# Altium footprint library Footprint-Lib-PhilsLab.PcbLib: 352 footprints (part 3 of 22)
Each footprint in its own frame and in the unit in brackets; x right, y up, seen from the top. Pads: shape width x height; smd on the part's side, far side on the other; paste and mask are expansions set on the pad; w line width, h text height; cw(c..) or ccw(c..) is an arc to the next point about the centre after c.
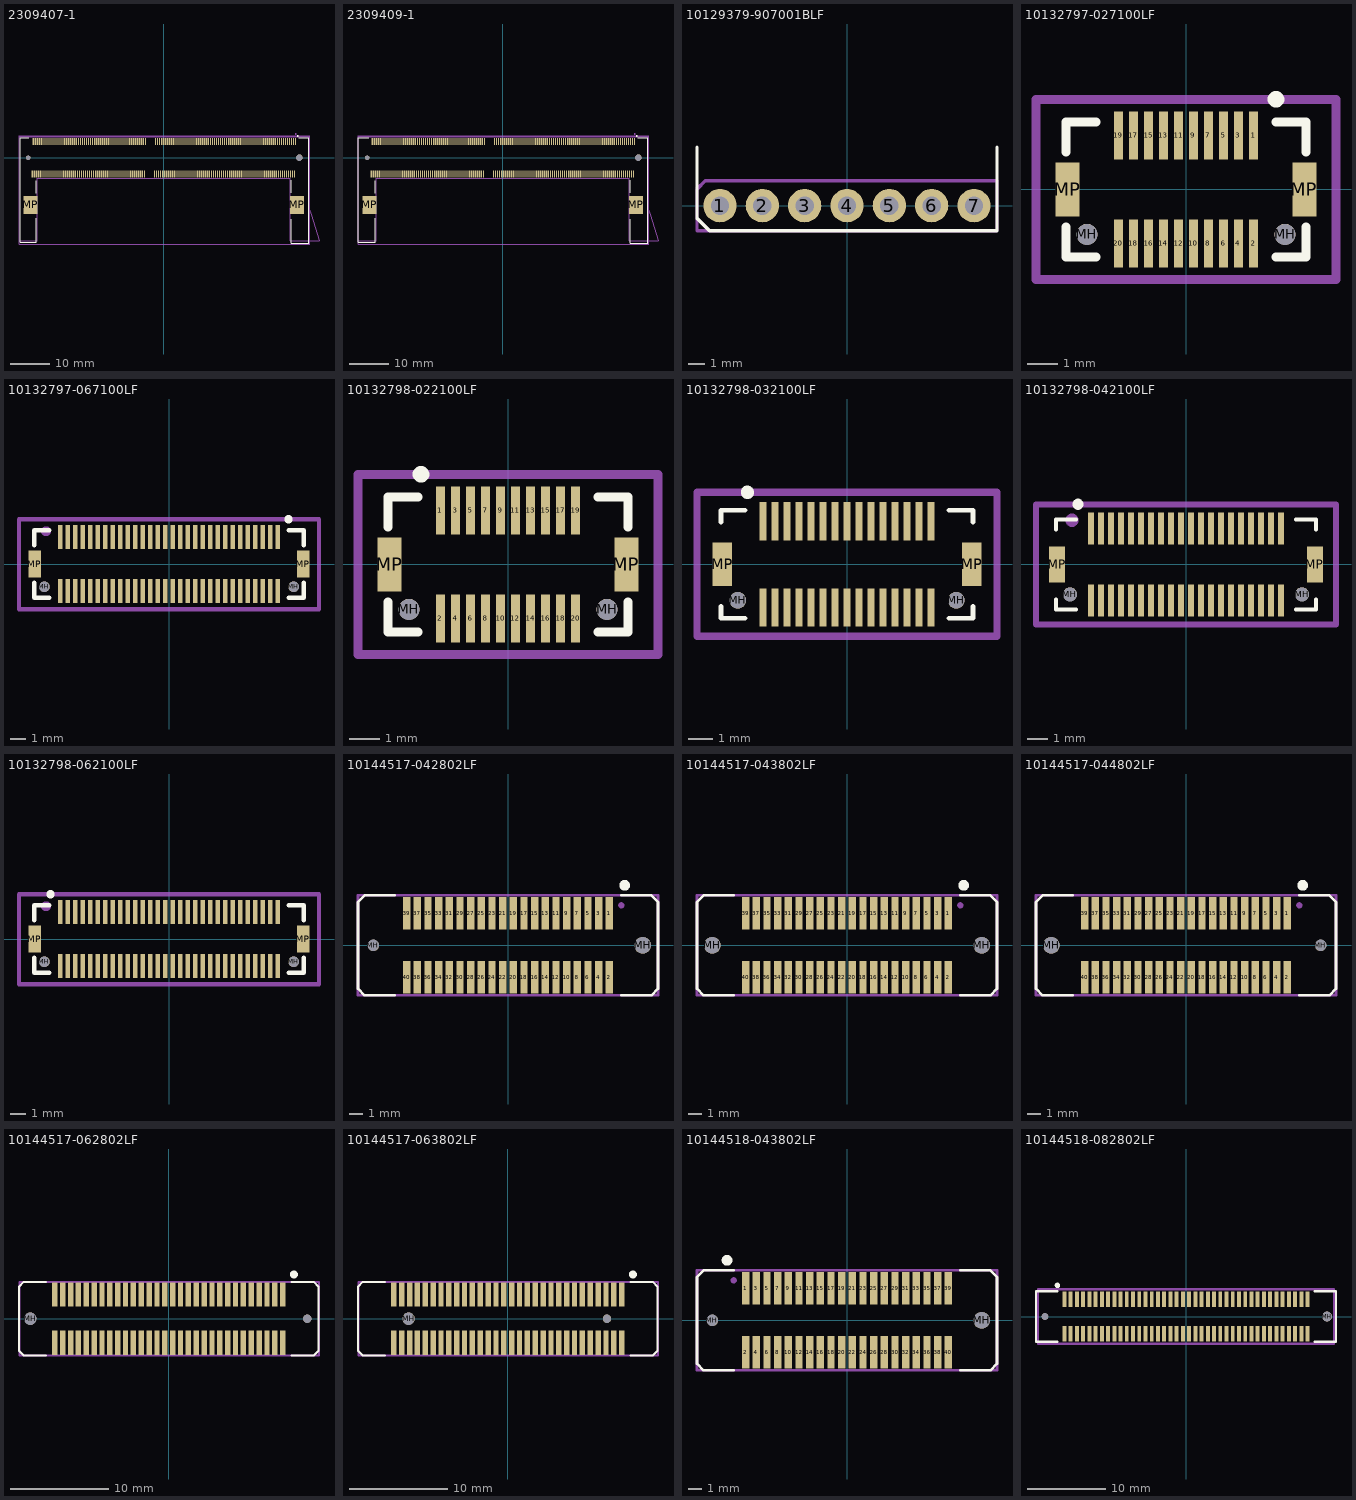
[diagram p2: the footprints below, top view; thin cyan lines are the x and y axes]

## 2309407-1 [mm]
pads (264):
  rect 0.3x1.75 smd mask+0.15: 1(33.375,4.1) 2(33.125,-4.1) 3(32.875,4.1) 4(32.625,-4.1) 5(32.375,4.1) 6(32.125,-4.1) 7(31.875,4.1) 8(31.625,-4.1) 9(31.375,4.1) 10(31.125,-4.1) 11(30.875,4.1) 12(30.625,-4.1) 13(30.375,4.1) 14(30.125,-4.1) 15(29.875,4.1) 16(29.625,-4.1) 17(29.375,4.1) 18(29.125,-4.1) 19(28.875,4.1) 20(28.625,-4.1) 21(28.375,4.1) 22(28.125,-4.1) 23(27.875,4.1) 24(27.625,-4.1) 25(27.375,4.1) 26(27.125,-4.1) 27(26.875,4.1) 28(26.625,-4.1) 29(26.375,4.1) 30(26.125,-4.1) 31(25.875,4.1) 32(25.625,-4.1) 33(25.375,4.1) 34(25.125,-4.1) 35(24.875,4.1) 36(24.625,-4.1) 37(24.375,4.1) 38(24.125,-4.1) 39(23.875,4.1) 40(23.625,-4.1) 41(23.375,4.1) 42(23.125,-4.1) 43(22.875,4.1) 44(22.625,-4.1) 45(22.375,4.1) 46(22.125,-4.1) 47(21.875,4.1) 48(21.625,-4.1) 49(21.375,4.1) 50(21.125,-4.1) 51(20.875,4.1) 52(20.625,-4.1) 53(20.375,4.1) 54(20.125,-4.1) 55(19.875,4.1) 56(19.625,-4.1) 57(19.375,4.1) 58(19.125,-4.1) 59(18.875,4.1) 60(18.625,-4.1) 61(18.375,4.1) 62(18.125,-4.1) 63(17.875,4.1) 64(17.625,-4.1) 65(17.375,4.1) 66(17.125,-4.1) 67(16.875,4.1) 68(16.625,-4.1) 69(16.375,4.1) 70(16.125,-4.1) 71(15.875,4.1) 72(15.625,-4.1) 73(15.375,4.1) 74(15.125,-4.1) 75(14.875,4.1) 76(14.625,-4.1) 77(14.375,4.1) 78(14.125,-4.1) 79(13.875,4.1) 80(13.625,-4.1) 81(13.375,4.1) 82(13.125,-4.1) 83(12.875,4.1) 84(12.625,-4.1) 85(12.375,4.1) 86(12.125,-4.1) 87(11.875,4.1) 88(11.625,-4.1) 89(11.375,4.1) 90(11.125,-4.1) 91(10.875,4.1) 92(10.625,-4.1) 93(10.375,4.1) 94(10.125,-4.1) 95(9.875,4.1) 96(9.625,-4.1) 97(9.375,4.1) 98(9.125,-4.1) 99(8.875,4.1) 100(8.625,-4.1) 101(8.375,4.1) 102(8.125,-4.1) 103(7.875,4.1) 104(7.625,-4.1) 105(7.375,4.1) 106(7.125,-4.1) 107(6.875,4.1) 108(6.625,-4.1) 109(6.375,4.1) 110(6.125,-4.1) 111(5.875,4.1) 112(5.625,-4.1) 113(5.375,4.1) 114(5.125,-4.1) 115(4.875,4.1) 116(4.625,-4.1) 117(4.375,4.1) 118(4.125,-4.1) 119(3.875,4.1) 120(3.625,-4.1) 121(3.375,4.1) 122(3.125,-4.1) 123(2.875,4.1) 124(2.625,-4.1) 125(2.375,4.1) 126(2.125,-4.1) 127(1.875,4.1) 128(1.625,-4.1) 129(1.375,4.1) 130(1.125,-4.1) 131(0.875,4.1) 132(0.625,-4.1) 133(0.375,4.1) 134(0.125,-4.1) 135(-0.125,4.1) 136(-0.375,-4.1) 137(-0.625,4.1) 138(-0.875,-4.1) 139(-1.125,4.1) 140(-1.375,-4.1) 141(-1.625,4.1) 142(-1.875,-4.1) 143(-2.125,4.1) 144(-2.375,-4.1) 145(-4.625,4.1) 146(-4.875,-4.1) 147(-5.125,4.1) 148(-5.375,-4.1) 149(-5.625,4.1) 150(-5.875,-4.1) 151(-6.125,4.1) 152(-6.375,-4.1) 153(-6.625,4.1) 154(-6.875,-4.1) 155(-7.125,4.1) 156(-7.375,-4.1) 157(-7.625,4.1) 158(-7.875,-4.1) 159(-8.125,4.1) 160(-8.375,-4.1) 161(-8.625,4.1) 162(-8.875,-4.1) 163(-9.125,4.1) 164(-9.375,-4.1) 165(-9.625,4.1) 166(-9.875,-4.1) 167(-10.125,4.1) 168(-10.375,-4.1) 169(-10.625,4.1) 170(-10.875,-4.1) 171(-11.125,4.1) 172(-11.375,-4.1) 173(-11.625,4.1) 174(-11.875,-4.1) 175(-12.125,4.1) 176(-12.375,-4.1) 177(-12.625,4.1) 178(-12.875,-4.1) 179(-13.125,4.1) 180(-13.375,-4.1) 181(-13.625,4.1) 182(-13.875,-4.1) 183(-14.125,4.1) 184(-14.375,-4.1) 185(-14.625,4.1) 186(-14.875,-4.1) 187(-15.125,4.1) 188(-15.375,-4.1) 189(-15.625,4.1) 190(-15.875,-4.1) 191(-16.125,4.1) 192(-16.375,-4.1) 193(-16.625,4.1) 194(-16.875,-4.1) 195(-17.125,4.1) 196(-17.375,-4.1) 197(-17.625,4.1) 198(-17.875,-4.1) 199(-18.125,4.1) 200(-18.375,-4.1) 201(-18.625,4.1) 202(-18.875,-4.1) 203(-19.125,4.1) 204(-19.375,-4.1) 205(-19.625,4.1) 206(-19.875,-4.1) 207(-20.125,4.1) 208(-20.375,-4.1) 209(-20.625,4.1) 210(-20.875,-4.1) 211(-21.125,4.1) 212(-21.375,-4.1) 213(-21.625,4.1) 214(-21.875,-4.1) 215(-22.125,4.1) 216(-22.375,-4.1) 217(-22.625,4.1) 218(-22.875,-4.1) 219(-23.125,4.1) 220(-23.375,-4.1) 221(-23.625,4.1) 222(-23.875,-4.1) 223(-24.125,4.1) 224(-24.375,-4.1) 225(-24.625,4.1) 226(-24.875,-4.1) 227(-25.125,4.1) 228(-25.375,-4.1) 229(-25.625,4.1) 230(-25.875,-4.1) 231(-26.125,4.1) 232(-26.375,-4.1) 233(-26.625,4.1) 234(-26.875,-4.1) 235(-27.125,4.1) 236(-27.375,-4.1) 237(-27.625,4.1) 238(-27.875,-4.1) 239(-28.125,4.1) 240(-28.375,-4.1) 241(-28.625,4.1) 242(-28.875,-4.1) 243(-29.125,4.1) 244(-29.375,-4.1) 245(-29.625,4.1) 246(-29.875,-4.1) 247(-30.125,4.1) 248(-30.375,-4.1) 249(-30.625,4.1) 250(-30.875,-4.1) 251(-31.125,4.1) 252(-31.375,-4.1) 253(-31.625,4.1) 254(-31.875,-4.1) 255(-32.125,4.1) 256(-32.375,-4.1) 257(-32.625,4.1) 258(-32.875,-4.1) 259(-33.125,4.1) 260(-33.375,-4.1)
  rect 3.5x4.6 smd: MP(-33.8,-12) MP(33.8,-12)
  round 1.1 hole 1.1 unplated: ""(-34.4,0)
  round 1.6 hole 1.6 unplated: ""(34.4,0)
Top Overlay:
  circle w0.21: c34,5.5 r0.1
  lines w0.3: -34.225,5 -36.375,5 -36.375,-16.8 -36.375,-21.5 -32.325,-21.5 -32.325,-15.402 ; -32.325,-9 -32.325,-5.85 ; 32.325,-15.6 32.325,-21.75 36.75,-21.75 36.75,5 34.225,5 ; 32.325,-8.85 32.325,-5.7
Mechanical 13:
  circle w0.254: c33.5,6 r0.102
  lines w0.2: -36.75,-22 37,-22 37,5.5 -3.5,5.5 -36.75,5.5 -36.75,-22
  text "'.Designator'" at -5.665,-0.417 h1
Mechanical 15:
  lines w0.05: -36.625,-21.1 -36.625,5.25 36.875,5.25 36.875,-13.081 37.375,-14.531 39.375,-21.1 32.075,-21.1 32.075,-5.25 -32.075,-5.25 -32.075,-21.1 -36.625,-21.1
3D body "2309407-1.stp": height 4.11, standoff -0.39, extent -36.5,-20.85 36.5,5

## 2309409-1 [mm]
pads (264):
  rect 0.3x1.75 smd mask+0.15: 1(33.375,4.1) 2(33.125,-4.1) 3(32.875,4.1) 4(32.625,-4.1) 5(32.375,4.1) 6(32.125,-4.1) 7(31.875,4.1) 8(31.625,-4.1) 9(31.375,4.1) 10(31.125,-4.1) 11(30.875,4.1) 12(30.625,-4.1) 13(30.375,4.1) 14(30.125,-4.1) 15(29.875,4.1) 16(29.625,-4.1) 17(29.375,4.1) 18(29.125,-4.1) 19(28.875,4.1) 20(28.625,-4.1) 21(28.375,4.1) 22(28.125,-4.1) 23(27.875,4.1) 24(27.625,-4.1) 25(27.375,4.1) 26(27.125,-4.1) 27(26.875,4.1) 28(26.625,-4.1) 29(26.375,4.1) 30(26.125,-4.1) 31(25.875,4.1) 32(25.625,-4.1) 33(25.375,4.1) 34(25.125,-4.1) 35(24.875,4.1) 36(24.625,-4.1) 37(24.375,4.1) 38(24.125,-4.1) 39(23.875,4.1) 40(23.625,-4.1) 41(23.375,4.1) 42(23.125,-4.1) 43(22.875,4.1) 44(22.625,-4.1) 45(22.375,4.1) 46(22.125,-4.1) 47(21.875,4.1) 48(21.625,-4.1) 49(21.375,4.1) 50(21.125,-4.1) 51(20.875,4.1) 52(20.625,-4.1) 53(20.375,4.1) 54(20.125,-4.1) 55(19.875,4.1) 56(19.625,-4.1) 57(19.375,4.1) 58(19.125,-4.1) 59(18.875,4.1) 60(18.625,-4.1) 61(18.375,4.1) 62(18.125,-4.1) 63(17.875,4.1) 64(17.625,-4.1) 65(17.375,4.1) 66(17.125,-4.1) 67(16.875,4.1) 68(16.625,-4.1) 69(16.375,4.1) 70(16.125,-4.1) 71(15.875,4.1) 72(15.625,-4.1) 73(15.375,4.1) 74(15.125,-4.1) 75(14.875,4.1) 76(14.625,-4.1) 77(14.375,4.1) 78(14.125,-4.1) 79(13.875,4.1) 80(13.625,-4.1) 81(13.375,4.1) 82(13.125,-4.1) 83(12.875,4.1) 84(12.625,-4.1) 85(12.375,4.1) 86(12.125,-4.1) 87(11.875,4.1) 88(11.625,-4.1) 89(11.375,4.1) 90(11.125,-4.1) 91(10.875,4.1) 92(10.625,-4.1) 93(10.375,4.1) 94(10.125,-4.1) 95(9.875,4.1) 96(9.625,-4.1) 97(9.375,4.1) 98(9.125,-4.1) 99(8.875,4.1) 100(8.625,-4.1) 101(8.375,4.1) 102(8.125,-4.1) 103(7.875,4.1) 104(7.625,-4.1) 105(7.375,4.1) 106(7.125,-4.1) 107(6.875,4.1) 108(6.625,-4.1) 109(6.375,4.1) 110(6.125,-4.1) 111(5.875,4.1) 112(5.625,-4.1) 113(5.375,4.1) 114(5.125,-4.1) 115(4.875,4.1) 116(4.625,-4.1) 117(4.375,4.1) 118(4.125,-4.1) 119(3.875,4.1) 120(3.625,-4.1) 121(3.375,4.1) 122(3.125,-4.1) 123(2.875,4.1) 124(2.625,-4.1) 125(2.375,4.1) 126(2.125,-4.1) 127(1.875,4.1) 128(1.625,-4.1) 129(1.375,4.1) 130(1.125,-4.1) 131(0.875,4.1) 132(0.625,-4.1) 133(0.375,4.1) 134(0.125,-4.1) 135(-0.125,4.1) 136(-0.375,-4.1) 137(-0.625,4.1) 138(-0.875,-4.1) 139(-1.125,4.1) 140(-1.375,-4.1) 141(-1.625,4.1) 142(-1.875,-4.1) 143(-2.125,4.1) 144(-2.375,-4.1) 145(-4.625,4.1) 146(-4.875,-4.1) 147(-5.125,4.1) 148(-5.375,-4.1) 149(-5.625,4.1) 150(-5.875,-4.1) 151(-6.125,4.1) 152(-6.375,-4.1) 153(-6.625,4.1) 154(-6.875,-4.1) 155(-7.125,4.1) 156(-7.375,-4.1) 157(-7.625,4.1) 158(-7.875,-4.1) 159(-8.125,4.1) 160(-8.375,-4.1) 161(-8.625,4.1) 162(-8.875,-4.1) 163(-9.125,4.1) 164(-9.375,-4.1) 165(-9.625,4.1) 166(-9.875,-4.1) 167(-10.125,4.1) 168(-10.375,-4.1) 169(-10.625,4.1) 170(-10.875,-4.1) 171(-11.125,4.1) 172(-11.375,-4.1) 173(-11.625,4.1) 174(-11.875,-4.1) 175(-12.125,4.1) 176(-12.375,-4.1) 177(-12.625,4.1) 178(-12.875,-4.1) 179(-13.125,4.1) 180(-13.375,-4.1) 181(-13.625,4.1) 182(-13.875,-4.1) 183(-14.125,4.1) 184(-14.375,-4.1) 185(-14.625,4.1) 186(-14.875,-4.1) 187(-15.125,4.1) 188(-15.375,-4.1) 189(-15.625,4.1) 190(-15.875,-4.1) 191(-16.125,4.1) 192(-16.375,-4.1) 193(-16.625,4.1) 194(-16.875,-4.1) 195(-17.125,4.1) 196(-17.375,-4.1) 197(-17.625,4.1) 198(-17.875,-4.1) 199(-18.125,4.1) 200(-18.375,-4.1) 201(-18.625,4.1) 202(-18.875,-4.1) 203(-19.125,4.1) 204(-19.375,-4.1) 205(-19.625,4.1) 206(-19.875,-4.1) 207(-20.125,4.1) 208(-20.375,-4.1) 209(-20.625,4.1) 210(-20.875,-4.1) 211(-21.125,4.1) 212(-21.375,-4.1) 213(-21.625,4.1) 214(-21.875,-4.1) 215(-22.125,4.1) 216(-22.375,-4.1) 217(-22.625,4.1) 218(-22.875,-4.1) 219(-23.125,4.1) 220(-23.375,-4.1) 221(-23.625,4.1) 222(-23.875,-4.1) 223(-24.125,4.1) 224(-24.375,-4.1) 225(-24.625,4.1) 226(-24.875,-4.1) 227(-25.125,4.1) 228(-25.375,-4.1) 229(-25.625,4.1) 230(-25.875,-4.1) 231(-26.125,4.1) 232(-26.375,-4.1) 233(-26.625,4.1) 234(-26.875,-4.1) 235(-27.125,4.1) 236(-27.375,-4.1) 237(-27.625,4.1) 238(-27.875,-4.1) 239(-28.125,4.1) 240(-28.375,-4.1) 241(-28.625,4.1) 242(-28.875,-4.1) 243(-29.125,4.1) 244(-29.375,-4.1) 245(-29.625,4.1) 246(-29.875,-4.1) 247(-30.125,4.1) 248(-30.375,-4.1) 249(-30.625,4.1) 250(-30.875,-4.1) 251(-31.125,4.1) 252(-31.375,-4.1) 253(-31.625,4.1) 254(-31.875,-4.1) 255(-32.125,4.1) 256(-32.375,-4.1) 257(-32.625,4.1) 258(-32.875,-4.1) 259(-33.125,4.1) 260(-33.375,-4.1)
  rect 3.5x4.6 smd: MP(-33.8,-12) MP(33.8,-12)
  round 1.1 hole 1.1 unplated: ""(-34.4,0)
  round 1.6 hole 1.6 unplated: ""(34.4,0)
Top Overlay:
  circle w0.21: c34,5.5 r0.1
  lines w0.3: -34,5 -36.75,5 -36.75,-21.5 -32.325,-21.5 -32.325,-15.402 ; -32.325,-9 -32.325,-5.85 ; 32.325,-15.6 32.325,-21.75 36.75,-21.75 36.75,5 34.225,5 ; 32.325,-8.85 32.325,-5.7
Mechanical 13:
  circle w0.254: c33.5,6 r0.102
  lines w0.2: -36.75,-22 37,-22 37,5.5 -3.5,5.5 -36.75,5.5 -36.75,-22
  text "'.Designator'" at -5.665,-0.417 h1
Mechanical 15:
  lines w0.05: -36.625,-21.1 -36.625,5.25 36.875,5.25 36.875,-13.081 37.375,-14.531 39.375,-21.1 32.075,-21.1 32.075,-5.25 -32.075,-5.25 -32.075,-21.1 -36.625,-21.1
3D body "2309409-1.stp": height 5.15, standoff -0.4, extent -36.5,-20.85 36.5,5

## 10129379-907001BLF [mm]
pads (7):
  round 2 hole 1.1: 1(-7.62,0) 2(-5.08,0) 3(-2.54,0) 4(0,0) 5(2.54,0) 6(5.08,0) 7(7.62,0)
Top Overlay:
  lines w0.2: -9,3.5 -9,-0.75 -8.25,-1.5 9,-1.5 9,3.5
Mechanical 13:
  lines w0.2: -9,-1.5 -8.75,-1.5 9,-1.5 9,1.5 -8.5,1.5 -9,1 -9,-1.5
  text "'.Designator'" at -5.665,-0.417 h1
3D body "10129379-907001BLF.stp": height 2.42, standoff -3.04, extent -8.89,-0.315 8.89,9.905

## 10132797-027100LF [mm]
pads (24):
  rect 0.3x1.6 smd mask+0.15: 1(2.25,1.8) 2(2.25,-1.8) 3(1.75,1.8) 4(1.75,-1.8) 5(1.25,1.8) 6(1.25,-1.8) 7(0.75,1.8) 8(0.75,-1.8) 9(0.25,1.8) 10(0.25,-1.8) 11(-0.25,1.8) 12(-0.25,-1.8) 13(-0.75,1.8) 14(-0.75,-1.8) 15(-1.25,1.8) 16(-1.25,-1.8) 17(-1.75,1.8) 18(-1.75,-1.8) 19(-2.25,1.8) 20(-2.25,-1.8)
  round 0.7 hole 0.7 unplated: MH(-3.3,-1.5) MH(3.3,-1.5)
  rect 0.8x1.8 smd mask+0.4: MP(-3.95,0) MP(3.95,0)
Top Overlay:
  circle w0.5: c3,3 r0.026
  lines w0.3: -4,-1.25 -4,-2.25 -3,-2.25 ; -4,1.25 -4,2.25 -3,2.25 ; 3,-2.25 4,-2.25 4,-1.25 ; 3,2.25 4,2.25 4,1.25
Mechanical 13:
  lines w0.3: -5,-3 -5,3 5,3 5,-3 -5,-3
  text "'.Designator'" at -5.815,-0.9 h1
3D body "10132797-027100LF.stp": height 5.31, standoff -0.49, extent -4,-2.31 4,2.29

## 10132797-067100LF [mm]
pads (64):
  rect 0.3x1.6 smd mask+0.15: 1(7.25,1.8) 2(7.25,-1.8) 3(6.75,1.8) 4(6.75,-1.8) 5(6.25,1.8) 6(6.25,-1.8) 7(5.75,1.8) 8(5.75,-1.8) 9(5.25,1.8) 10(5.25,-1.8) 11(4.75,1.8) 12(4.75,-1.8) 13(4.25,1.8) 14(4.25,-1.8) 15(3.75,1.8) 16(3.75,-1.8) 17(3.25,1.8) 18(3.25,-1.8) 19(2.75,1.8) 20(2.75,-1.8) 21(2.25,1.8) 22(2.25,-1.8) 23(1.75,1.8) 24(1.75,-1.8) 25(1.25,1.8) 26(1.25,-1.8) 27(0.75,1.8) 28(0.75,-1.8) 29(0.25,1.8) 30(0.25,-1.8) 31(-0.25,1.8) 32(-0.25,-1.8) 33(-0.75,1.8) 34(-0.75,-1.8) 35(-1.25,1.8) 36(-1.25,-1.8) 37(-1.75,1.8) 38(-1.75,-1.8) 39(-2.25,1.8) 40(-2.25,-1.8) 41(-2.75,1.8) 42(-2.75,-1.8) 43(-3.25,1.8) 44(-3.25,-1.8) 45(-3.75,1.8) 46(-3.75,-1.8) 47(-4.25,1.8) 48(-4.25,-1.8) 49(-4.75,1.8) 50(-4.75,-1.8) 51(-5.25,1.8) 52(-5.25,-1.8) 53(-5.75,1.8) 54(-5.75,-1.8) 55(-6.25,1.8) 56(-6.25,-1.8) 57(-6.75,1.8) 58(-6.75,-1.8) 59(-7.25,1.8) 60(-7.25,-1.8)
  round 0.7 hole 0.7 unplated: MH(-8.3,-1.5) MH(8.3,-1.5)
  rect 0.8x1.8 smd mask+0.4: MP(-8.95,0) MP(8.95,0)
Top Overlay:
  lines w0.3: -9,-1.25 -9,-2.25 -8,-2.25 ; -9,1.25 -9,2.25 -8,2.25 ; 8,-2.25 9,-2.25 9,-1.25 ; 8,2.25 9,2.25 9,1.25
  lines w0.5: 8,3 cw(c7.974,3) 8,3.002
Mechanical 13:
  circle w0.5: c-8.2,2.2 r0.079
  lines w0.3: -10,-3 -10,3 10,3 10,-3 -10,-3
  text "'.Designator'" at -5.815,-0.9 h1
3D body "10132797-067100LF.stp": height 5.31, standoff -0.49, extent -9,-2.31 9,2.29

## 10132798-022100LF [mm]
pads (24):
  rect 0.3x1.6 smd mask+0.15: 1(-2.25,1.8) 2(-2.25,-1.8) 3(-1.75,1.8) 4(-1.75,-1.8) 5(-1.25,1.8) 6(-1.25,-1.8) 7(-0.75,1.8) 8(-0.75,-1.8) 9(-0.25,1.8) 10(-0.25,-1.8) 11(0.25,1.8) 12(0.25,-1.8) 13(0.75,1.8) 14(0.75,-1.8) 15(1.25,1.8) 16(1.25,-1.8) 17(1.75,1.8) 18(1.75,-1.8) 19(2.25,1.8) 20(2.25,-1.8)
  round 0.7 hole 0.7 unplated: MH(-3.3,-1.5) MH(3.3,-1.5)
  rect 0.8x1.8 smd mask+0.4: MP(-3.95,0) MP(3.95,0)
Top Overlay:
  circle w0.5: c-2.9,3 r0.026
  lines w0.3: -4,-1.25 -4,-2.25 -3,-2.25 ; -4,1.25 -4,2.25 -3,2.25 ; 3,-2.25 4,-2.25 4,-1.25 ; 3,2.25 4,2.25 4,1.25
Mechanical 13:
  lines w0.3: -5,-3 5,-3 5,3 -5,3 -5,-3
  text "'.Designator'" at -5.815,-0.9 h1
3D body "10132798-022100LF.stp": height 2.71, standoff -0.49, extent -4.05,-2.3 4.05,2.3

## 10132798-032100LF [mm]
pads (34):
  rect 0.3x1.6 smd mask+0.15: 1(-3.5,1.8) 2(-3.5,-1.8) 3(-3,1.8) 4(-3,-1.8) 5(-2.5,1.8) 6(-2.5,-1.8) 7(-2,1.8) 8(-2,-1.8) 9(-1.5,1.8) 10(-1.5,-1.8) 11(-1,1.8) 12(-1,-1.8) 13(-0.5,1.8) 14(-0.5,-1.8) 15(0,1.8) 16(0,-1.8) 17(0.5,1.8) 18(0.5,-1.8) 19(1,1.8) 20(1,-1.8) 21(1.5,1.8) 22(1.5,-1.8) 23(2,1.8) 24(2,-1.8) 25(2.5,1.8) 26(2.5,-1.8) 27(3,1.8) 28(3,-1.8) 29(3.5,1.8) 30(3.5,-1.8)
  round 0.7 hole 0.7 unplated: MH(-4.55,-1.5) MH(4.55,-1.5)
  rect 0.8x1.8 smd mask+0.4: MP(-5.2,0) MP(5.2,0)
Top Overlay:
  circle w0.5: c-4.15,3 r0.026
  lines w0.2: -5.25,-1.75 -5.25,-2.25 -4.25,-2.25 ; -5.25,1.75 -5.25,2.25 -4.25,2.25 ; 4.25,-2.25 5.25,-2.25 5.25,-1.75 ; 4.25,2.25 5.25,2.25 5.25,1.75
Mechanical 13:
  lines w0.3: -6.25,-3 -6.25,3 6.25,3 6.25,-3 -6.25,-3
  text "'.Designator'" at -5.815,-0.9 h1
3D body "10132798-032100LF.stp": height 2.71, standoff -0.49, extent -5.3,-2.3 5.3,2.3

## 10132798-042100LF [mm]
pads (44):
  rect 0.3x1.6 smd mask+0.15: 1(-4.75,1.8) 2(-4.75,-1.8) 3(-4.25,1.8) 4(-4.25,-1.8) 5(-3.75,1.8) 6(-3.75,-1.8) 7(-3.25,1.8) 8(-3.25,-1.8) 9(-2.75,1.8) 10(-2.75,-1.8) 11(-2.25,1.8) 12(-2.25,-1.8) 13(-1.75,1.8) 14(-1.75,-1.8) 15(-1.25,1.8) 16(-1.25,-1.8) 17(-0.75,1.8) 18(-0.75,-1.8) 19(-0.25,1.8) 20(-0.25,-1.8) 21(0.25,1.8) 22(0.25,-1.8) 23(0.75,1.8) 24(0.75,-1.8) 25(1.25,1.8) 26(1.25,-1.8) 27(1.75,1.8) 28(1.75,-1.8) 29(2.25,1.8) 30(2.25,-1.8) 31(2.75,1.8) 32(2.75,-1.8) 33(3.25,1.8) 34(3.25,-1.8) 35(3.75,1.8) 36(3.75,-1.8) 37(4.25,1.8) 38(4.25,-1.8) 39(4.75,1.8) 40(4.75,-1.8)
  round 0.7 hole 0.7 unplated: MH(-5.8,-1.5) MH(5.8,-1.5)
  rect 0.8x1.8 smd mask+0.4: MP(-6.45,0) MP(6.45,0)
Top Overlay:
  circle w0.5: c-5.4,3 r0.026
  lines w0.2: -6.5,-1.75 -6.5,-2.25 -5.5,-2.25 ; -6.5,1.75 -6.5,2.25 -5.5,2.25 ; 5.5,-2.25 6.5,-2.25 6.5,-1.75 ; 5.5,2.25 6.5,2.25 6.5,1.75
Mechanical 13:
  circle w0.5: c-5.7,2.2 r0.079
  lines w0.3: -7.5,-3 -7.5,3 7.5,3 7.5,-3 -7.5,-3
  text "'.Designator'" at -5.815,-0.9 h1
3D body "10132798-042100LF.stp": height 2.71, standoff -0.49, extent -6.55,-2.3 6.55,2.3

## 10132798-062100LF [mm]
pads (64):
  rect 0.3x1.6 smd mask+0.15: 1(-7.25,1.8) 2(-7.25,-1.8) 3(-6.75,1.8) 4(-6.75,-1.8) 5(-6.25,1.8) 6(-6.25,-1.8) 7(-5.75,1.8) 8(-5.75,-1.8) 9(-5.25,1.8) 10(-5.25,-1.8) 11(-4.75,1.8) 12(-4.75,-1.8) 13(-4.25,1.8) 14(-4.25,-1.8) 15(-3.75,1.8) 16(-3.75,-1.8) 17(-3.25,1.8) 18(-3.25,-1.8) 19(-2.75,1.8) 20(-2.75,-1.8) 21(-2.25,1.8) 22(-2.25,-1.8) 23(-1.75,1.8) 24(-1.75,-1.8) 25(-1.25,1.8) 26(-1.25,-1.8) 27(-0.75,1.8) 28(-0.75,-1.8) 29(-0.25,1.8) 30(-0.25,-1.8) 31(0.25,1.8) 32(0.25,-1.8) 33(0.75,1.8) 34(0.75,-1.8) 35(1.25,1.8) 36(1.25,-1.8) 37(1.75,1.8) 38(1.75,-1.8) 39(2.25,1.8) 40(2.25,-1.8) 41(2.75,1.8) 42(2.75,-1.8) 43(3.25,1.8) 44(3.25,-1.8) 45(3.75,1.8) 46(3.75,-1.8) 47(4.25,1.8) 48(4.25,-1.8) 49(4.75,1.8) 50(4.75,-1.8) 51(5.25,1.8) 52(5.25,-1.8) 53(5.75,1.8) 54(5.75,-1.8) 55(6.25,1.8) 56(6.25,-1.8) 57(6.75,1.8) 58(6.75,-1.8) 59(7.25,1.8) 60(7.25,-1.8)
  round 0.7 hole 0.7 unplated: MH(-8.3,-1.5) MH(8.3,-1.5)
  rect 0.8x1.8 smd mask+0.4: MP(-8.95,0) MP(8.95,0)
Top Overlay:
  circle w0.5: c-7.9,3 r0.026
  lines w0.3: -9,-1.25 -9,-2.25 -8,-2.25 ; -9,1.25 -9,2.25 -8,2.25 ; 8,-2.25 9,-2.25 9,-1.25 ; 8,2.25 9,2.25 9,1.25
Mechanical 13:
  circle w0.5: c-8.2,2.2 r0.079
  lines w0.3: -10,-3 -10,3 10,3 10,-3 -10,-3
  text "'.Designator'" at -5.815,-0.9 h1
3D body "10132798-062100LF.stp": height 2.71, standoff -0.49, extent -9.05,-2.3 9.05,2.3

## 10144517-042802LF [mm]
pads (42):
  rect 0.55x2.45 smd: 1(7.6,2.4) 2(7.6,-2.4) 3(6.8,2.4) 4(6.8,-2.4) 5(6,2.4) 6(6,-2.4) 7(5.2,2.4) 8(5.2,-2.4) 9(4.4,2.4) 10(4.4,-2.4) 11(3.6,2.4) 12(3.6,-2.4) 13(2.8,2.4) 14(2.8,-2.4) 15(2,2.4) 16(2,-2.4) 17(1.2,2.4) 18(1.2,-2.4) 19(0.4,2.4) 20(0.4,-2.4) 21(-0.4,2.4) 22(-0.4,-2.4) 23(-1.2,2.4) 24(-1.2,-2.4) 25(-2,2.4) 26(-2,-2.4) 27(-2.8,2.4) 28(-2.8,-2.4) 29(-3.6,2.4) 30(-3.6,-2.4) 31(-4.4,2.4) 32(-4.4,-2.4) 33(-5.2,2.4) 34(-5.2,-2.4) 35(-6,2.4) 36(-6,-2.4) 37(-6.8,2.4) 38(-6.8,-2.4) 39(-7.6,2.4) 40(-7.6,-2.4)
  round 0.85 hole 0.85 unplated: MH(-10.1,0)
  round 1.25 hole 1.25 unplated: MH(10.1,0)
Top Overlay:
  circle w0.4: c8.75,4.5 r0.2
  lines w0.2: -8.5,-3.75 -10.75,-3.75 -11.25,-3.25 -11.25,3.25 -10.75,3.75 -8.5,3.75 ; 8.5,-3.75 10.75,-3.75 11.25,-3.25 11.25,3.25 10.75,3.75 8.5,3.75
Mechanical 13:
  circle w0.254: c8.5,3 r0.107
  lines w0.2: -11.25,0 -11.25,3.75 11.25,3.75 11.25,-3.75 -11.25,-3.75 -11.25,3.25
  text "'.Designator'" at -5.665,-0.417 h1
3D body "10144517-042x0xlf.stp": height 7.68, standoff -0.67, extent -10.9,-3.4 10.9,3.4

## 10144517-043802LF [mm]
pads (42):
  rect 0.55x2.45 smd: 1(7.6,2.4) 2(7.6,-2.4) 3(6.8,2.4) 4(6.8,-2.4) 5(6,2.4) 6(6,-2.4) 7(5.2,2.4) 8(5.2,-2.4) 9(4.4,2.4) 10(4.4,-2.4) 11(3.6,2.4) 12(3.6,-2.4) 13(2.8,2.4) 14(2.8,-2.4) 15(2,2.4) 16(2,-2.4) 17(1.2,2.4) 18(1.2,-2.4) 19(0.4,2.4) 20(0.4,-2.4) 21(-0.4,2.4) 22(-0.4,-2.4) 23(-1.2,2.4) 24(-1.2,-2.4) 25(-2,2.4) 26(-2,-2.4) 27(-2.8,2.4) 28(-2.8,-2.4) 29(-3.6,2.4) 30(-3.6,-2.4) 31(-4.4,2.4) 32(-4.4,-2.4) 33(-5.2,2.4) 34(-5.2,-2.4) 35(-6,2.4) 36(-6,-2.4) 37(-6.8,2.4) 38(-6.8,-2.4) 39(-7.6,2.4) 40(-7.6,-2.4)
  round 1.25 hole 1.25 unplated: MH(-10.1,0) MH(10.1,0)
Top Overlay:
  circle w0.4: c8.75,4.5 r0.2
  lines w0.2: -8.5,-3.75 -10.75,-3.75 -11.25,-3.25 -11.25,3.25 -10.75,3.75 -8.5,3.75 ; 8.5,-3.75 10.75,-3.75 11.25,-3.25 11.25,3.25 10.75,3.75 8.5,3.75
Mechanical 13:
  circle w0.254: c8.5,3 r0.107
  lines w0.2: -11.25,0 -11.25,3.75 11.25,3.75 11.25,-3.75 -11.25,-3.75 -11.25,3.25
  text "'.Designator'" at -5.665,-0.417 h1
3D body "10144517-043x0xxx.stp": height 11.71, standoff -0.44, extent -10.9,-3.4 10.9,3.4

## 10144517-044802LF [mm]
pads (42):
  rect 0.55x2.45 smd: 1(7.6,2.4) 2(7.6,-2.4) 3(6.8,2.4) 4(6.8,-2.4) 5(6,2.4) 6(6,-2.4) 7(5.2,2.4) 8(5.2,-2.4) 9(4.4,2.4) 10(4.4,-2.4) 11(3.6,2.4) 12(3.6,-2.4) 13(2.8,2.4) 14(2.8,-2.4) 15(2,2.4) 16(2,-2.4) 17(1.2,2.4) 18(1.2,-2.4) 19(0.4,2.4) 20(0.4,-2.4) 21(-0.4,2.4) 22(-0.4,-2.4) 23(-1.2,2.4) 24(-1.2,-2.4) 25(-2,2.4) 26(-2,-2.4) 27(-2.8,2.4) 28(-2.8,-2.4) 29(-3.6,2.4) 30(-3.6,-2.4) 31(-4.4,2.4) 32(-4.4,-2.4) 33(-5.2,2.4) 34(-5.2,-2.4) 35(-6,2.4) 36(-6,-2.4) 37(-6.8,2.4) 38(-6.8,-2.4) 39(-7.6,2.4) 40(-7.6,-2.4)
  round 1.25 hole 1.25 unplated: MH(-10.1,0)
  round 0.85 hole 0.85 unplated: MH(10.1,0)
Top Overlay:
  circle w0.4: c8.75,4.5 r0.2
  lines w0.2: -8.5,-3.75 -10.75,-3.75 -11.25,-3.25 -11.25,3.25 -10.75,3.75 -8.5,3.75 ; 8.5,-3.75 10.75,-3.75 11.25,-3.25 11.25,3.25 10.75,3.75 8.5,3.75
Mechanical 13:
  circle w0.254: c8.5,3 r0.107
  lines w0.2: -11.25,0 -11.25,3.75 11.25,3.75 11.25,-3.75 -11.25,-3.75 -11.25,3.25
  text "'.Designator'" at -5.665,-0.417 h1
3D body "10144517-044x0xxx.stp": height 15.71, standoff -0.69, extent -10.9,-3.4 10.9,3.4

## 10144517-062802LF [mm]
pads (62):
  rect 0.55x2.45 smd: 1(11.6,2.45) 2(11.6,-2.45) 3(10.8,2.45) 4(10.8,-2.45) 5(10,2.45) 6(10,-2.45) 7(9.2,2.45) 8(9.2,-2.45) 9(8.4,2.45) 10(8.4,-2.45) 11(7.6,2.45) 12(7.6,-2.45) 13(6.8,2.45) 14(6.8,-2.45) 15(6,2.45) 16(6,-2.45) 17(5.2,2.45) 18(5.2,-2.45) 19(4.4,2.45) 20(4.4,-2.45) 21(3.6,2.45) 22(3.6,-2.45) 23(2.8,2.45) 24(2.8,-2.45) 25(2,2.45) 26(2,-2.45) 27(1.2,2.45) 28(1.2,-2.45) 29(0.4,2.45) 30(0.4,-2.45) 31(-0.4,2.45) 32(-0.4,-2.45) 33(-1.2,2.45) 34(-1.2,-2.45) 35(-2,2.45) 36(-2,-2.45) 37(-2.8,2.45) 38(-2.8,-2.45) 39(-3.6,2.45) 40(-3.6,-2.45) 41(-4.4,2.45) 42(-4.4,-2.45) 43(-5.2,2.45) 44(-5.2,-2.45) 45(-6,2.45) 46(-6,-2.45) 47(-6.8,2.45) 48(-6.8,-2.45) 49(-7.6,2.45) 50(-7.6,-2.45) 51(-8.4,2.45) 52(-8.4,-2.45) 53(-9.2,2.45) 54(-9.2,-2.45) 55(-10,2.45) 56(-10,-2.45) 57(-10.8,2.45) 58(-10.8,-2.45) 59(-11.6,2.45) 60(-11.6,-2.45)
  round 1.25 hole 1.25 unplated: MH(-14.1,0)
  round 0.85 hole 0.85 unplated: MH(14.1,0)
Top Overlay:
  circle w0.4: c12.75,4.5 r0.2
  lines w0.2: -12.5,-3.75 -14.75,-3.75 -15.25,-3.25 -15.25,3.25 -14.75,3.75 -12.5,3.75 ; 12.5,-3.75 14.75,-3.75 15.25,-3.25 15.25,3.25 14.75,3.75 12.5,3.75
Mechanical 13:
  circle w0.254: c11.6,3.1 r0.107
  lines w0.2: -15.2,-3.75 -15.2,3.75 15.3,3.75 15.3,-3.75 -15.2,-3.75
  text "'.Designator'" at -5.665,-0.417 h1
3D body "10144517-062802LF.stp": height 7.71, standoff -0.69, extent -14.9,-3.4 14.9,3.4

## 10144517-063802LF [mm]
pads (62):
  rect 0.55x2.45 smd: 1(11.6,2.45) 2(11.6,-2.45) 3(10.8,2.45) 4(10.8,-2.45) 5(10,2.45) 6(10,-2.45) 7(9.2,2.45) 8(9.2,-2.45) 9(8.4,2.45) 10(8.4,-2.45) 11(7.6,2.45) 12(7.6,-2.45) 13(6.8,2.45) 14(6.8,-2.45) 15(6,2.45) 16(6,-2.45) 17(5.2,2.45) 18(5.2,-2.45) 19(4.4,2.45) 20(4.4,-2.45) 21(3.6,2.45) 22(3.6,-2.45) 23(2.8,2.45) 24(2.8,-2.45) 25(2,2.45) 26(2,-2.45) 27(1.2,2.45) 28(1.2,-2.45) 29(0.4,2.45) 30(0.4,-2.45) 31(-0.4,2.45) 32(-0.4,-2.45) 33(-1.2,2.45) 34(-1.2,-2.45) 35(-2,2.45) 36(-2,-2.45) 37(-2.8,2.45) 38(-2.8,-2.45) 39(-3.6,2.45) 40(-3.6,-2.45) 41(-4.4,2.45) 42(-4.4,-2.45) 43(-5.2,2.45) 44(-5.2,-2.45) 45(-6,2.45) 46(-6,-2.45) 47(-6.8,2.45) 48(-6.8,-2.45) 49(-7.6,2.45) 50(-7.6,-2.45) 51(-8.4,2.45) 52(-8.4,-2.45) 53(-9.2,2.45) 54(-9.2,-2.45) 55(-10,2.45) 56(-10,-2.45) 57(-10.8,2.45) 58(-10.8,-2.45) 59(-11.6,2.45) 60(-11.6,-2.45)
  round 1.25 hole 1.25 unplated: MH(-10.1,0)
  round 0.85 hole 0.85 unplated: MH(10.1,0)
Top Overlay:
  circle w0.4: c12.75,4.5 r0.2
  lines w0.2: -12.5,-3.75 -14.75,-3.75 -15.25,-3.25 -15.25,3.25 -14.75,3.75 -12.5,3.75 ; 12.5,-3.75 14.75,-3.75 15.25,-3.25 15.25,3.25 14.75,3.75 12.5,3.75
Mechanical 13:
  circle w0.254: c11.6,3.1 r0.107
  lines w0.2: -15.2,-3.75 -15.2,3.75 15.3,3.75 15.3,-3.75 -15.2,-3.75
  text "'.Designator'" at -5.665,-0.417 h1
3D body "10144517-063802LF.stp": height 11.65, standoff -0.75, extent -14.9,-3.4 14.9,3.4

## 10144518-043802LF [mm]
pads (42):
  rect 0.55x2.45 smd: 1(-7.6,2.4) 2(-7.6,-2.4) 3(-6.8,2.4) 4(-6.8,-2.4) 5(-6,2.4) 6(-6,-2.4) 7(-5.2,2.4) 8(-5.2,-2.4) 9(-4.4,2.4) 10(-4.4,-2.4) 11(-3.6,2.4) 12(-3.6,-2.4) 13(-2.8,2.4) 14(-2.8,-2.4) 15(-2,2.4) 16(-2,-2.4) 17(-1.2,2.4) 18(-1.2,-2.4) 19(-0.4,2.4) 20(-0.4,-2.4) 21(0.4,2.4) 22(0.4,-2.4) 23(1.2,2.4) 24(1.2,-2.4) 25(2,2.4) 26(2,-2.4) 27(2.8,2.4) 28(2.8,-2.4) 29(3.6,2.4) 30(3.6,-2.4) 31(4.4,2.4) 32(4.4,-2.4) 33(5.2,2.4) 34(5.2,-2.4) 35(6,2.4) 36(6,-2.4) 37(6.8,2.4) 38(6.8,-2.4) 39(7.6,2.4) 40(7.6,-2.4)
  round 0.85 hole 0.85 unplated: MH(-10.1,0)
  round 1.25 hole 1.25 unplated: MH(10.1,0)
Top Overlay:
  circle w0.4: c-9,4.5 r0.2
  lines w0.2: -8.5,-3.75 -10.75,-3.75 -11.25,-3.25 -11.25,3.25 -10.75,3.75 -8.5,3.75 ; 8.5,-3.75 10.75,-3.75 11.25,-3.25 11.25,3.25 10.75,3.75 8.5,3.75
Mechanical 13:
  circle w0.254: c-8.5,3 r0.107
  lines w0.2: -11.25,0 -11.25,3.75 11.25,3.75 11.25,-3.75 -11.25,-3.75 -11.25,3.25
  text "'.Designator'" at -5.665,-0.417 h1
3D body "10144518-043x0xxx.stp": height 6.71, standoff -0.64, extent -10.9,-3 10.9,3

## 10144518-082802LF [mm]
pads (82):
  rect 0.5x2 smd: 1(-15.6,2.2) 2(-15.6,-2.2) 3(-14.8,2.2) 4(-14.8,-2.2) 5(-14,2.2) 6(-14,-2.2) 7(-13.2,2.2) 8(-13.2,-2.2) 9(-12.4,2.2) 10(-12.4,-2.2) 11(-11.6,2.2) 12(-11.6,-2.2) 13(-10.8,2.2) 14(-10.8,-2.2) 15(-10,2.2) 16(-10,-2.2) 17(-9.2,2.2) 18(-9.2,-2.2) 19(-8.4,2.2) 20(-8.4,-2.2) 21(-7.6,2.2) 22(-7.6,-2.2) 23(-6.8,2.2) 24(-6.8,-2.2) 25(-6,2.2) 26(-6,-2.2) 27(-5.2,2.2) 28(-5.2,-2.2) 29(-4.4,2.2) 30(-4.4,-2.2) 31(-3.6,2.2) 32(-3.6,-2.2) 33(-2.8,2.2) 34(-2.8,-2.2) 35(-2,2.2) 36(-2,-2.2) 37(-1.2,2.2) 38(-1.2,-2.2) 39(-0.4,2.2) 40(-0.4,-2.2) 41(0.4,2.2) 42(0.4,-2.2) 43(1.2,2.2) 44(1.2,-2.2) 45(2,2.2) 46(2,-2.2) 47(2.8,2.2) 48(2.8,-2.2) 49(3.6,2.2) 50(3.6,-2.2) 51(4.4,2.2) 52(4.4,-2.2) 53(5.2,2.2) 54(5.2,-2.2) 55(6,2.2) 56(6,-2.2) 57(6.8,2.2) 58(6.8,-2.2) 59(7.6,2.2) 60(7.6,-2.2) 61(8.4,2.2) 62(8.4,-2.2) 63(9.2,2.2) 64(9.2,-2.2) 65(10,2.2) 66(10,-2.2) 67(10.8,2.2) 68(10.8,-2.2) 69(11.6,2.2) 70(11.6,-2.2) 71(12.4,2.2) 72(12.4,-2.2) 73(13.2,2.2) 74(13.2,-2.2) 75(14,2.2) 76(14,-2.2) 77(14.8,2.2) 78(14.8,-2.2) 79(15.6,2.2) 80(15.6,-2.2)
  round 0.85 hole 0.85 unplated: MH(-18.1,0)
  round 1.25 hole 1.25 unplated: MH(18.1,0)
Top Overlay:
  circle w0.4: c-16.5,4 r0.15
  lines w0.3: -16.5,-3.25 -19.25,-3.25 -19.25,3.25 -16.5,3.25 ; 16.5,-3.25 19.25,-3.25 19.25,3.25 16.5,3.25
Mechanical 13:
  lines w0.3: -19,-3.5 -19,3.5 19,3.5 19,-3.5 -19,-3.5
  text "'.Designator'" at -5.665,-0.417 h1
  text "1" at -17.167,2 h1
  text "2" at -17.333,-2.5 h1
3D body "10144518-082x0xxx.stp": height 5.71, standoff -0.64, extent -18.9,-3 18.9,3